# Altium footprint library PcbLib1.PcbLib: 6 footprints
Each footprint in its own frame and in the unit in brackets; x right, y up, seen from the top. Pads: shape width x height; smd on the part's side, far side on the other; paste and mask are expansions set on the pad; w line width, h text height; cw(c..) or ccw(c..) is an arc to the next point about the centre after c.
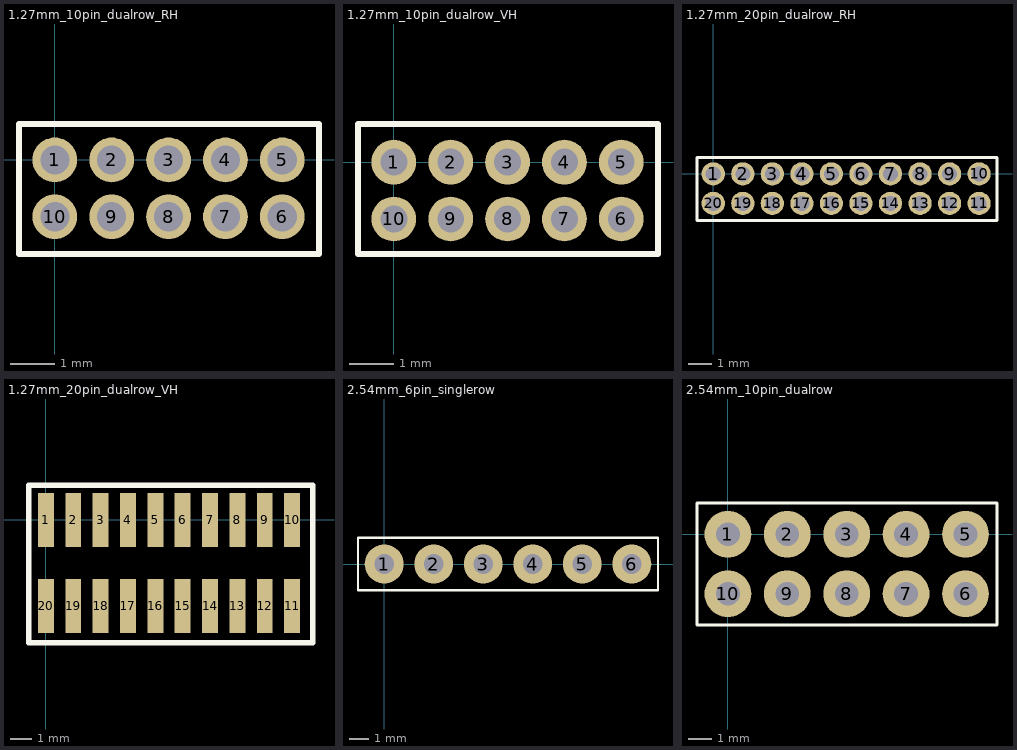
[diagram p0: the footprints below, top view; thin cyan lines are the x and y axes]

## 1.27mm_10pin_dualrow_RH [mm]
pads (10):
  round 1 hole 0.65: 1(0,0) 2(1.27,0) 3(2.54,0) 4(3.81,0) 5(5.08,0) 6(5.08,-1.27) 7(3.81,-1.27) 8(2.54,-1.27) 9(1.27,-1.27) 10(0,-1.27)
Top Overlay:
  lines w0.127: -0.8,-2.1 5.9,-2.1 5.9,0.8 -0.8,0.8 -0.8,-2.1

## 1.27mm_10pin_dualrow_VH [mm]
pads (10):
  round 1 hole 0.6: 1(0,0) 2(1.27,0) 3(2.54,0) 4(3.81,0) 5(5.08,0) 6(5.08,-1.27) 7(3.81,-1.27) 8(2.54,-1.27) 9(1.27,-1.27) 10(0,-1.27)
Top Overlay:
  lines w0.127: -0.8,-2.05 -0.8,0.85 5.9,0.85 5.9,-2.05 -0.8,-2.05

## 1.27mm_20pin_dualrow_RH [mm]
pads (20):
  round 1 hole 0.65: 1(0,0) 2(1.27,0) 3(2.54,0) 4(3.81,0) 5(5.08,0) 6(6.35,0) 7(7.62,0) 8(8.89,0) 9(10.16,0) 10(11.43,0) 11(11.43,-1.27) 12(10.16,-1.27) 13(8.89,-1.27) 14(7.62,-1.27) 15(6.35,-1.27) 16(5.08,-1.27) 17(3.81,-1.27) 18(2.54,-1.27) 19(1.27,-1.27) 20(0,-1.27)
Top Overlay:
  lines w0.127: -0.7,-2 12.2,-2 12.2,0.7 -0.7,0.7 -0.7,-2

## 1.27mm_20pin_dualrow_VH [mm]
pads (20):
  rect 0.74x2.5 smd: 1(0,0) 2(1.27,0) 3(2.54,0) 4(3.81,0) 5(5.08,0) 6(6.35,0) 7(7.62,0) 8(8.89,0) 9(10.16,0) 10(11.43,0) 11(11.43,-4) 12(10.16,-4) 13(8.89,-4) 14(7.62,-4) 15(6.35,-4) 16(5.08,-4) 17(3.81,-4) 18(2.54,-4) 19(1.27,-4) 20(0,-4)
Top Overlay:
  lines w0.254: -0.8,-5.7 12.4,-5.7 12.4,-3.875 12.4,-0.225 12.4,1.6 -0.8,1.6 -0.8,-5.7

## 2.54mm_6pin_singlerow [mm]
pads (6):
  round 2 hole 1.02: 1(0,0) 2(2.54,0) 3(5.08,0) 4(7.62,0) 5(10.16,0) 6(12.7,0)
Top Overlay:
  lines w0.127: -1.346,-1.346 -1.346,1.346 14.046,1.346 14.046,-1.346 -1.346,-1.346
3D body "User Library-zl201-6_p2-54_l15-24_w2-54_h8-89.STEP": height 2.85, standoff -9.09, extent -1.27,-1.27 13.97,1.27

## 2.54mm_10pin_dualrow [mm]
pads (10):
  round 2 hole 1.02: 1(0,0) 2(2.54,0) 3(5.08,0) 4(7.62,0) 5(10.16,0) 6(10.16,-2.54) 7(7.62,-2.54) 8(5.08,-2.54) 9(2.54,-2.54) 10(0,-2.54)
Top Overlay:
  lines w0.127: -1.321,-3.886 -1.321,1.346 11.506,1.346 11.506,-3.886 -1.321,-3.886
3D body "90131-0765.stp": height 8.75, standoff -3.4, extent -1.25,-3.815 11.45,1.265